# Altium schematic symbol library IRLZ44N.SchLib: 17 symbols
Pins are listed as number, name and electrical type; pins without a type are passive.

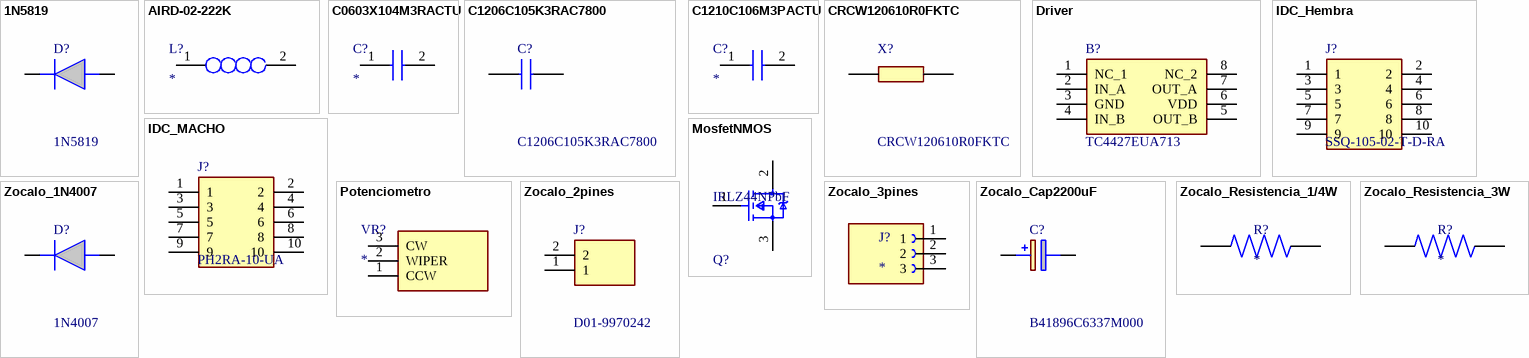
[diagram p0: symbols 1N5819 to Zocalo_Resistencia_3W]

## 1N5819
designator D?
Schottky Barrier Rectifier Diodes; Manufacturer_Name: Diotec; Mouser Part Number: 637-1N5819; Mouser Price/Stock: https://www.mouser.co.uk/ProductDetail/Diotec-Semiconductor/1N5819?qs=OlC7AqGiEDlzWAEqP18zhw%3D%3D; Manufacturer_Part_Number: 1N5819; Datasheet Link: https://www.diodes.com/assets/Datasheets/ds23001.pdf
footprint DIOAD1408W86L464D236
pins: 1 K, 2 A

## AIRD-02-222K
designator L?
Inductor; Manufacturer_Name: ABRACON; Manufacturer_Part_Number: AIRD-02-222K; Datasheet Link: https://abracon.com/Magnetics/radial/AIRD02.pdf; Height: 21mm; Mouser Part Number: 815-AIRD-02-222K; Mouser Price/Stock: https://www.mouser.co.uk/ProductDetail/ABRACON/AIRD-02-222K?qs=qV1JnYL3zOzbPmurb06pXg%3D%3D; Arrow Part Number: AIRD-02-222K; Arrow Price/Stock: https://www.arrow.com/en/products/aird-02-222k/abracon
footprint AIRD-02
pins: 1, 2

## C0603X104M3RACTU
designator C?
Capacitor; Manufacturer_Name: Yageo Group; Manufacturer_Part_Number: C0603X104M3RACTU; Datasheet Link: https://www.yageogroup.com/content/datasheet/asset/file/KEM_C1013_X7R_FT-CAP_SMD; Height: 0.87mm; Mouser Part Number: 80-C0603X104M3R; Mouser Price/Stock: https://www.mouser.co.uk/ProductDetail/KEMET/C0603X104M3RACTU?qs=p6yRp5s%252B%2FXSQKNqxiIj6xg%3D%3D; Arrow Part Number: C0603X104M3RACTU; Arrow Price/Stock: https://www.arrow.com/en/products/c0603x104m3ractu/kemet-corporation
footprint C0603
pins: 1, 2

## C1206C105K3RAC7800
designator C?
Multilayer Ceramic Capacitors MLCC - SMD/SMT 25V 1uF X7R 1206 10%; Manufacturer_Name: Yageo Group; Geometry.Height: 1.4mm; Mouser Part Number: 80-C1206C105K3R7800; Mouser Price/Stock: https://www.mouser.co.uk/ProductDetail/KEMET/C1206C105K3RAC7800?qs=9Bh1%2FLvCqWR5qBTiXKKjKA%3D%3D; Manufacturer_Part_Number: C1206C105K3RAC7800; Datasheet Link: https://connect.kemet.com:7667/gateway/IntelliData-ComponentDocumentation/1.0/download/specsheet/C1206C105K3RACTU
footprint CAPC3216X140N
pins: 1, 2

## C1210C106M3PACTU
designator C?
Capacitor; Manufacturer_Name: Yageo Group; Manufacturer_Part_Number: C1210C106M3PACTU; Datasheet Link: https://www.yageogroup.com/content/datasheet/asset/file/KEM_C1006_X5R_SMD; Mouser Part Number: 80-C1210C106M3P; Mouser Price/Stock: https://www.mouser.com/Search/Refine.aspx?Keyword=80-C1210C106M3P
footprint C1210
pins: 1, 2

## CRCW120610R0FKTC
designator X?
Standard Thick Film Chip Resistors value 10R0 ohm.; Manufacturer_Name: Vishay; Geometry.Height: 0.6mm; Mouser Part Number: *; Mouser Price/Stock: *; Manufacturer_Part_Number: CRCW120610R0FKTC; Datasheet Link: *
footprint RESC3216X60N
pins: 1, 2

## Driver
designator B?, comment TC4427EUA713
TC4427A Series 1.5 A 18 Vmax 7 Ohm Dual Non Inverting MOSFET Driver - MSOP-8; Manufacturer_Name: Microchip; Geometry.Height: 1.1mm; Mouser Part Number: 579-TC4427EUA713; Mouser Price/Stock: https://www.mouser.co.uk/ProductDetail/Microchip-Technology/TC4427EUA713?qs=6pREnGtJ7gG%2Fg%252Bua4Jcb3A%3D%3D; Manufacturer_Part_Number: TC4427EUA713; Datasheet Link: https://ww1.microchip.com/downloads/en/DeviceDoc/20001422G.pdf
footprint SOP65P490X110-8N
pins: 1 NC_1, 2 IN_A, 3 GND, 4 IN_B, 5 OUT_B, 6 VDD, 7 OUT_A, 8 NC_2

## IDC_Hembra
designator J?, comment SSQ-105-02-T-D-RA
CONN RECEPTACLE, 2.54MM, R/A DUAL 10WAY; Manufacturer_Name: SAMTEC; Geometry.Height: 4.95mm; Mouser Part Number: 200-SSQ10502TDRA; Mouser Price/Stock: https://www.mouser.co.uk/ProductDetail/Samtec/SSQ-105-02-T-D-RA?qs=rU5fayqh%252BE3CzX1JlRzx2A%3D%3D; Manufacturer_Part_Number: SSQ-105-02-T-D-RA; Datasheet Link: http://suddendocs.samtec.com/catalog_english/ssq_th.pdf
footprint IDC_Hembra
pins: 1, 2, 3, 4, 5, 6, 7, 8, 9, 10

## IDC_MACHO
designator J?, comment PH2RA-10-UA
CONN HEADER R/A 10POS 2.54MM; Manufacturer_Name: Adam Tech; Geometry.Height: 5.381mm; Mouser Part Number: 737-PH2RA-10-UA; Mouser Price/Stock: https://www.mouser.co.uk/ProductDetail/Adam-Tech/PH2RA-10-UA?qs=HoCaDK9Nz5eXic%252Bmj6sc5g%3D%3D; Manufacturer_Part_Number: PH2RA-10-UA; Datasheet Link: https://app.adam-tech.com/products/download/data_sheet/200508/ph2ra-xx-ua-data-sheet.pdf
footprint HDRRA10W64P254_2X5_1270X250X538P
pins: 1, 2, 3, 4, 5, 6, 7, 8, 9, 10

## MosfetNMOS
designator Q?, comment IRLZ44NPbF
MOSFET N-CH 55V 47A TO220AB; Turn-On Delay Time: 11ns; Gate to Source Voltage (Vgs): 16V; Element Configuration: Single; Rds On Max: 22mR; Turn-Off Delay Time: 26ns; Max Power Dissipation: 110W; Threshold Voltage: 2V; Drain to Source Resistance: 35mR; Input Capacitance: 1.7nF; Continuous Drain Current (ID): 47A; Case/Package: TO-220; Lead Free: Lead Free; Halogen Free: Halogen Free; Packaging: Rail/Tube; Length: 0.414inch; Min Operating Temperature: -55°C; REACH SVHC: No SVHC; Number of Pins: 3; Width: 0.185inch; Drain to Source Voltage (Vdss): 55V; Power Dissipation: 110W; RoHS Compliant: Yes; Max Operating Temperature: 175°C; Height: 0.6inch; Max Dual Supply Voltage: 55V; Drain to Source Breakdown Voltage: 55V; Mount: Through Hole
footprint FP-PG-TO220-3-MFG
pins: 1 G, 2 D, 3 S

## Potenciometro
designator VR?
Variable Resistor; Manufacturer_Name: Bourns; Manufacturer_Part_Number: PDB181-K420K-502B; Datasheet Link: https://www.bourns.com/docs/product-datasheets/PDB18.pdf; Height: 16.5mm; Mouser Part Number: 652-PDB181-K420K502B; Mouser Price/Stock: https://www.mouser.co.uk/ProductDetail/Bourns/PDB181-K420K-502B?qs=Ivs1Be2ZGq6EMYRq4LQhiA%3D%3D; Arrow Part Number: PDB181-K420K-502B; Arrow Price/Stock: https://www.arrow.com/en/products/pdb181-k420k-502b/bourns?region=nac
footprint PDB181K220K104B
pins: 1 CCW, 2 WIPER, 3 CW

## Zocalo_1N4007
designator D?, comment 1N4007
Switching diode with a peak reverse voltage of 1 kV, a maximum forward current of 1 A, and a peak repetitive forward current of 5.4 A; Manufacturer_Name: Diotec; Mouser Part Number: 637-1N4007; Mouser Price/Stock: https://www.mouser.co.uk/ProductDetail/Diotec-Semiconductor/1N4007?qs=OlC7AqGiEDmK9mU1uTiCkg%3D%3D; Manufacturer_Part_Number: 1N4007; Datasheet Link: https://diotec.com/tl_files/diotec/files/pdf/datasheets/1n4001.pdf
footprint Diodo1N4007
pins: 1 K, 2 A

## Zocalo_2pines
designator J?, comment D01-9970242
IC Socket: 2 Pos Receptacle SIL Straight THT Strip; Manufacturer_Name: Harwin; Geometry.Height: 4.2mm; Mouser Part Number: 855-D01-9970242; Mouser Price/Stock: https://www.mouser.co.uk/ProductDetail/Harwin/D01-9970242?qs=TpUtqFO9vU%252Bf37OJ5TYoTQ%3D%3D; Manufacturer_Part_Number: D01-9970242; Datasheet Link: https://content.harwin.com/m/e0b6c35948424a73/original/DRG-00097-Technical-Drawing-Datasheet-D01-997-pdf.pdf
footprint D019970242
pins: 1, 2

## Zocalo_3pines
designator J?
MP: D01-9970342; Package: None; Price: None; Value: *; Availability: Unavailable
footprint Zocalo_3pines
pins: 1, 2, 3

## Zocalo_Cap2200uF
designator C?, comment B41896C6337M000
Aluminum Electrolytic Capacitors - Radial Leaded 50VDC 330uF 20% STD Leads; Manufacturer_Name: TDK; Geometry.Height: 22mm; Mouser Part Number: 871-B41896C6337M000; Mouser Price/Stock: https://www.mouser.co.uk/ProductDetail/EPCOS-TDK/B41896C6337M000?qs=nadT%2FcWsIvCjUCa32zZtbg%3D%3D; Manufacturer_Part_Number: B41896C6337M000; Datasheet Link: https://product.tdk.com/system/files/dam/doc/product/capacitor/aluminum-electrolytic/single-ended/data_sheet/20/30/db/aec/b41896.pdf
footprint Capacitor2200uF
pins: 1 +, 2 -

## Zocalo_Resistencia_1/4W
designator R?
1.07 kOhms Â±1% 0.25W, 1/4W Through Hole Resistor Axial - Metal Film; MF: Yageo; MP: MFR-25FBF52-1K; SnapEDA_Link: https://www.snapeda.com/parts/MFR-25FBF52-1K/Yageo/view-part/?ref=snap; Package: RADIAL-2 YAGEO; Value: *; Check_prices: https://www.snapeda.com/parts/MFR-25FBF52-1K/Yageo/view-part/?ref=eda
footprint Resistencia
pins: 1, 2

## Zocalo_Resistencia_3W
designator R?
1.07 kOhms Â±1% 0.25W, 1/4W Through Hole Resistor Axial - Metal Film; MF: Yageo; MP: MFR-25FBF52-1K; SnapEDA_Link: https://www.snapeda.com/parts/MFR-25FBF52-1K/Yageo/view-part/?ref=snap; Package: RADIAL-2 YAGEO; Value: *; Check_prices: https://www.snapeda.com/parts/MFR-25FBF52-1K/Yageo/view-part/?ref=eda
footprint Resistencia3W
pins: 1, 2